# Altium footprint library Box.PcbLib: 5 footprints
Each footprint in its own frame and in the unit in brackets; x right, y up, seen from the top. Pads: shape width x height; smd on the part's side, far side on the other; paste and mask are expansions set on the pad; w line width, h text height; cw(c..) or ccw(c..) is an arc to the next point about the centre after c.
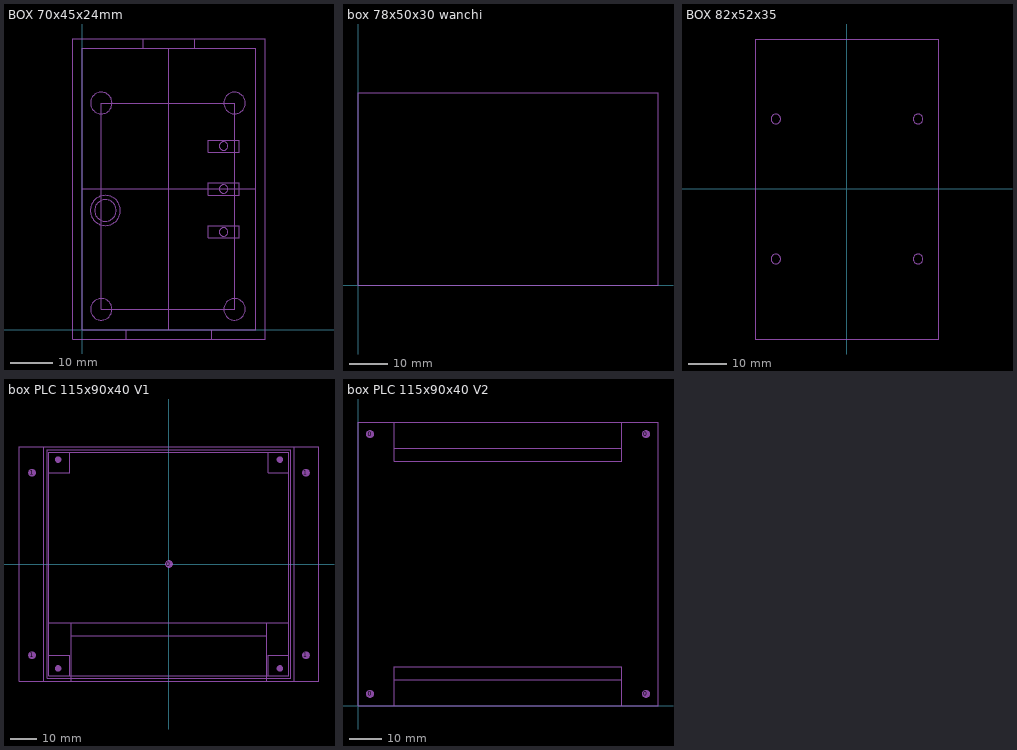
[diagram p0: the footprints below, top view; thin cyan lines are the x and y axes]

## BOX 70x45x24mm [mm]
Mechanical 1:
  lines w0.2: 10.2,-2.2 10.2,0 ; 14.2,65.4 14.2,67.6 ; 26.2,65.4 26.2,67.6 ; 30.2,-2.2 30.2,0 ; -2.2,-2.2 42.6,-2.2 42.6,67.6 -2.2,67.6 -2.2,-2.2 ; 0,0 40.4,0 40.4,65.4 0,65.4 0,0
Mechanical 3:
  circle w0.254: c5.4,27.7 r2.5
  lines w0.2: 0,32.7 40.4,32.7 ; 20.2,0 20.2,65.4 ; 29.3,21.3 36.5,21.3 36.5,24.1 29.3,24.1 29.3,21.3 ; 29.3,31.3 36.5,31.3 36.5,34.1 29.3,34.1 29.3,31.3 ; 29.3,41.3 29.3,44.1 36.5,44.1 36.5,41.3 29.3,41.3
Mechanical 4:
  circle w0.254: c32.9,32.7 r1
  circle w0.254: c32.9,42.7 r1
  circle w0.254: c32.9,22.7 r1
  circle w0.254: c5.4,27.7 r3.5
  circle w0.254: c4.45,4.7 r2.5
  circle w0.254: c35.45,4.7 r2.5
  circle w0.254: c4.45,52.7 r2.5
  circle w0.254: c35.45,52.7 r2.5
  lines w0.2: 4.45,4.7 35.45,4.7 35.45,52.7 4.45,52.7 4.45,4.7

## box 78x50x30 wanchi [mm] "box 78x50x30 wanchi"
Mechanical 15:
  lines w0.2: 0,0 0,50 78,50 78,0 0,0

## BOX 82x52x35 [mm]
Mechanical 15:
  circle w0.254: c18.4,18.1 r1.25
  circle w0.254: c-18.4,18.1 r1.25
  circle w0.254: c18.4,-18.1 r1.25
  circle w0.254: c-18.4,-18.1 r1.25
  lines w0.2: -23.7,-38.8 23.7,-38.8 23.7,38.8 -23.7,38.8 -23.7,-38.8

## box PLC 115x90x40 V1 [mm]
pads (9):
  round 2.5 on Mech15: 0(-42.5,-40) 0(-42.5,40) 0(42.5,-40) 0(42.5,40)
  round 3 on Mech15: 0(0,0) 1(-52.5,-35) 1(-52.5,35) 1(52.5,-35) 1(52.5,35)
Mechanical 1:
  lines w0.2: -46.75,-43.75 46.75,-43.75 46.75,43.75 -46.75,43.75 -46.75,-43.75
  text "keepout" at -31,44 h1.52
Mechanical 4:
  lines w0.2: -37.5,-45 -37.5,-22.5 37.5,-22.5 37.5,-45 ; -37.5,-27.5 37.5,-27.5 ; -57.5,-45 -57.5,45 57.5,45 57.5,-45 -57.5,-45
Mechanical 6:
  lines w0.2: -46,-35 -38,-35 -38,-42.75 ; -46,-22.5 -37.5,-22.5 -37.5,-42.75 ; -46,35 -38,35 -38,42.75 ; 37.5,-42.75 37.5,-22.5 46,-22.5 ; 38,-42.75 38,-35 46,-35 ; 38,42.75 38,35 46,35 ; -46,-42.75 46,-42.75 46,42.75 -46,42.75 -46,-42.75
Mechanical 15:
  lines w0.2: -48,-45 48,-45 48,45 -48,45 -48,-45

## box PLC 115x90x40 V2 [mm]
pads (4):
  round 2.5 on Mech15: 0(3.7,3.7) 0(3.7,83.7) 0(88.7,3.7) 0(88.7,83.7)
Mechanical 4:
  lines w0.254: 11.2,0.027 11.2,12.027 81.2,12.027 81.2,0.027 ; 11.2,87.373 11.2,75.373 81.2,75.373 81.2,87.373
Mechanical 6:
  lines w0.254: 11.2,0 11.2,8 81.2,8 81.2,0 ; 11.2,87.373 11.2,79.373 81.2,79.373 81.2,87.373
Mechanical 8:
  lines w0.2: 0,0 0,87.4 92.4,87.4 92.4,0 0,0